# Altium schematic symbol library TLV9041IDBVRG4.SchLib: 1 symbol
Pins are listed as number, name and electrical type; pins without a type are passive.

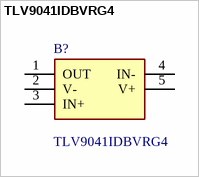
[diagram p0: symbol TLV9041IDBVRG4]

## TLV9041IDBVRG4
designator B?
Operational Amplifiers - Op Amps Single 5.5-V 350-k Hz ultra-low 1.2-V; Manufacturer_Name: Texas Instruments; Geometry.Height: 1.45mm; Mouser Part Number: *; Mouser Price/Stock: *; Manufacturer_Part_Number: TLV9041IDBVRG4; Datasheet Link: https://www.ti.com/lit/ds/symlink/tlv9041.pdf
footprint SOT95P280X145-5N
pins: 1 OUT, 2 V-, 3 IN+, 4 IN-, 5 V+